# Altium footprint library WR-WTB_2.00mm.PcbLib: 70 footprints (part 3 of 5)
Each footprint in its own frame and in the unit in brackets; x right, y up, seen from the top. Pads: shape width x height; smd on the part's side, far side on the other; paste and mask are expansions set on the pad; w line width, h text height; cw(c..) or ccw(c..) is an arc to the next point about the centre after c.
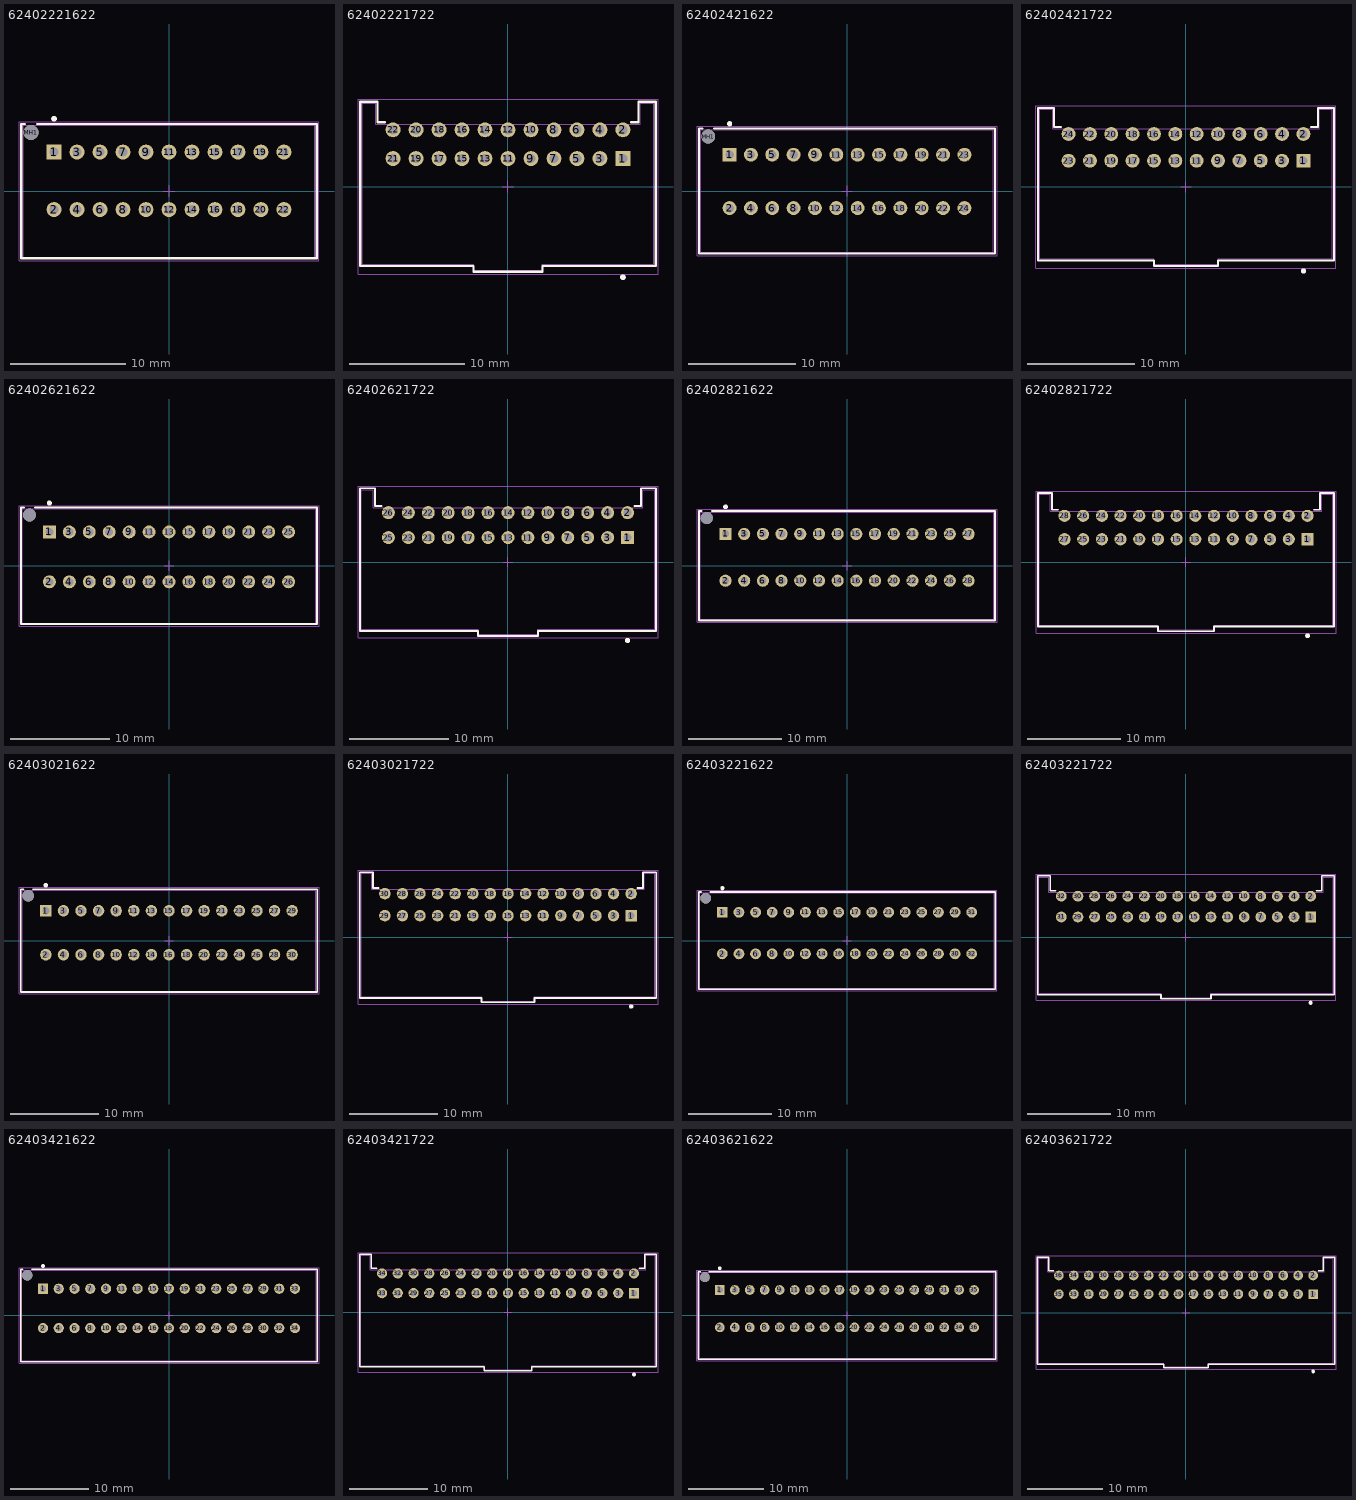
[diagram p2: the footprints below, top view; thin cyan lines are the x and y axes]

## 62402221622 [mm] "2.00mm Male Dual Row Vertical Shrouded Header with positive locking, 22p"
height 11.6
pads (23):
  rect 1.3x1.3 hole 0.8: 1(-10,3.4)
  round 1.3 hole 0.8: 2(-10,-1.6) 3(-8,3.4) 4(-8,-1.6) 5(-6,3.4) 6(-6,-1.6) 7(-4,3.4) 8(-4,-1.6) 9(-2,3.4) 10(-2,-1.6) 11(0,3.4) 12(0,-1.6) 13(2,3.4) 14(2,-1.6) 15(4,3.4) 16(4,-1.6) 17(6,3.4) 18(6,-1.6) 19(8,3.4) 20(8,-1.6) 21(10,3.4) 22(10,-1.6)
  round 1.3 hole 1.3 unplated: MH1(-12,5.1)
Top Overlay:
  circle w0.25: c-10,6.3 r0.125
  lines w0.2: -12.55,5.85 -12.85,5.85 -12.85,-5.85 12.85,-5.85 12.85,5.85 -11.45,5.85
Mechanical 13:
  lines w0.1: -12.7,-5.75 -12.7,5.75 ; -12.7,-5.75 12.7,-5.75 12.7,5.75 -12.7,5.75 ; -12.7,-5.75 -12.7,5.75
Mechanical 15:
  lines w0.05: -0.5,0 0.5,0 ; 0,-0.5 0,0.5 ; -13.05,-6.05 -13.05,6.05 13.05,6.05 13.05,-6.05 -13.05,-6.05
3D body "62402221622.stp": height 9.78, standoff -3.17, extent -12.7,-5.75 12.7,5.75

## 62402221722 [mm] "2.00mm Male Dual Row Horizontal Shrouded Header with positive locking, 22p"
height 11.7
pads (22):
  rect 1.3x1.3 hole 0.8: 1(10,2.45)
  round 1.3 hole 0.8: 2(10,4.95) 3(8,2.45) 4(8,4.95) 5(6,2.45) 6(6,4.95) 7(4,2.45) 8(4,4.95) 9(2,2.45) 10(2,4.95) 11(0,2.45) 12(0,4.95) 13(-2,2.45) 14(-2,4.95) 15(-4,2.45) 16(-4,4.95) 17(-6,2.45) 18(-6,4.95) 19(-8,2.45) 20(-8,4.95) 21(-10,2.45) 22(-10,4.95)
Top Overlay:
  circle w0.25: c10,-7.875 r0.125
  lines w0.2: -10.7,5.6 -11.35,5.6 -11.35,7.4 -12.85,7.4 -12.85,-6.9 -3,-6.9 -3,-7.4 3,-7.4 3,-6.9 12.85,-6.9 12.85,7.4 11.35,7.4 11.35,5.6 10.7,5.6
Mechanical 13:
  lines w0.1: -12.7,-6.75 -3,-6.75 -3,-7.25 3,-7.25 3,-6.75 12.7,-6.75 12.7,7.25 11.5,7.25 11.5,5.45 -11.5,5.45 -11.5,7.25 -12.7,7.25 -12.7,-6.75
Mechanical 15:
  lines w0.05: -0.5,0 0.5,0 ; 0,-0.5 0,0.5 ; -13.05,-7.6 13.05,-7.6 13.05,7.6 -13.05,7.6 -13.05,-7.6
3D body "62402221722.stp": height 11.73, standoff -3.17, extent -12.7,-7.25 12.7,7.25

## 62402421622 [mm] "2.00mm Male Dual Row Vertical Shrouded Header with positive locking, 24p"
height 11.6
pads (25):
  rect 1.3x1.3 hole 0.8: 1(-11,3.4)
  round 1.3 hole 0.8: 2(-11,-1.6) 3(-9,3.4) 4(-9,-1.6) 5(-7,3.4) 6(-7,-1.6) 7(-5,3.4) 8(-5,-1.6) 9(-3,3.4) 10(-3,-1.6) 11(-1,3.4) 12(-1,-1.6) 13(1,3.4) 14(1,-1.6) 15(3,3.4) 16(3,-1.6) 17(5,3.4) 18(5,-1.6) 19(7,3.4) 20(7,-1.6) 21(9,3.4) 22(9,-1.6) 23(11,3.4) 24(11,-1.6)
  round 1.3 hole 1.3 unplated: MH1(-13,5.1)
Top Overlay:
  circle w0.25: c-11,6.3 r0.125
  lines w0.2: -13.55,5.85 -13.85,5.85 -13.85,-5.85 13.85,-5.85 13.85,5.85 -12.45,5.85
Mechanical 13:
  lines w0.1: -13.7,-5.75 -13.7,5.75 ; -13.7,-5.75 13.7,-5.75 13.7,5.75 -13.7,5.75 ; -13.7,-5.75 -13.7,5.75
Mechanical 15:
  lines w0.05: -0.5,0 0.5,0 ; 0,-0.5 0,0.5 ; -14.05,-6.05 14.05,-6.05 14.05,6.05 -14.05,6.05 -14.05,-6.05
3D body "62402421622.stp": height 9.78, standoff -3.17, extent -13.7,-5.75 13.7,5.75

## 62402421722 [mm] "2.00mm Male Dual Row Horizontal Shrouded Header with positive locking, 24p"
height 11.7
pads (24):
  rect 1.3x1.3 hole 0.8: 1(11,2.45)
  round 1.3 hole 0.8: 2(11,4.95) 3(9,2.45) 4(9,4.95) 5(7,2.45) 6(7,4.95) 7(5,2.45) 8(5,4.95) 9(3,2.45) 10(3,4.95) 11(1,2.45) 12(1,4.95) 13(-1,2.45) 14(-1,4.95) 15(-3,2.45) 16(-3,4.95) 17(-5,2.45) 18(-5,4.95) 19(-7,2.45) 20(-7,4.95) 21(-9,2.45) 22(-9,4.95) 23(-11,2.45) 24(-11,4.95)
Top Overlay:
  circle w0.25: c11,-7.875 r0.125
  lines w0.2: -11.7,5.6 -12.35,5.6 -12.35,7.4 -13.85,7.4 -13.85,-6.9 -3,-6.9 -3,-7.4 3,-7.4 3,-6.9 13.85,-6.9 13.85,7.4 12.35,7.4 12.35,5.6 11.7,5.6
Mechanical 13:
  lines w0.1: -13.7,-6.75 -13.7,7.25 -12.5,7.25 -12.5,5.45 12.5,5.45 12.5,7.25 13.7,7.25 13.7,-6.75 3,-6.75 3,-7.25 -3,-7.25 -3,-6.75 -13.7,-6.75
Mechanical 15:
  lines w0.05: -0.5,0 0.5,0 ; 0,-0.5 0,0.5 ; -14.05,-7.6 -14.05,7.6 14.05,7.6 14.05,-7.6 -14.05,-7.6
3D body "62402421722.stp": height 11.73, standoff -3.17, extent -13.7,-7.25 13.7,7.25

## 62402621622 [mm] "2.00mm Male Dual Row Vertical Shrouded Header with positive locking, 26p"
height 11.6
pads (27):
  rect 1.3x1.3 hole 0.8: 1(-12,3.4)
  round 1.3 hole 0.8: 2(-12,-1.6) 3(-10,3.4) 4(-10,-1.6) 5(-8,3.4) 6(-8,-1.6) 7(-6,3.4) 8(-6,-1.6) 9(-4,3.4) 10(-4,-1.6) 11(-2,3.4) 12(-2,-1.6) 13(0,3.4) 14(0,-1.6) 15(2,3.4) 16(2,-1.6) 17(4,3.4) 18(4,-1.6) 19(6,3.4) 20(6,-1.6) 21(8,3.4) 22(8,-1.6) 23(10,3.4) 24(10,-1.6) 25(12,3.4) 26(12,-1.6)
  round 1.3 hole 1.3 unplated: MH1(-14,5.1)
Top Overlay:
  circle w0.25: c-12,6.3 r0.125
  lines w0.2: -14.55,5.85 -14.85,5.85 -14.85,-5.85 14.85,-5.85 14.85,5.85 -13.45,5.85
Mechanical 13:
  lines w0.1: -14.7,-5.75 -14.7,5.75 ; -14.7,-5.75 14.7,-5.75 14.7,5.75 -14.7,5.75 ; -14.7,-5.75 -14.7,5.75
Mechanical 15:
  lines w0.05: -0.5,0 0.5,0 ; 0,-0.5 0,0.5 ; -15.05,-6.05 -15.05,6.05 15.05,6.05 15.05,-6.05 -15.05,-6.05
3D body "62402621622.stp": height 9.78, standoff -3.17, extent -14.7,-5.75 14.7,5.75

## 62402621722 [mm] "2.00mm Male Dual Row Horizontal Shrouded Header with positive locking, 26p"
height 11.7
pads (26):
  rect 1.3x1.3 hole 0.8: 1(12,2.45)
  round 1.3 hole 0.8: 2(12,4.95) 3(10,2.45) 4(10,4.95) 5(8,2.45) 6(8,4.95) 7(6,2.45) 8(6,4.95) 9(4,2.45) 10(4,4.95) 11(2,2.45) 12(2,4.95) 13(0,2.45) 14(0,4.95) 15(-2,2.45) 16(-2,4.95) 17(-4,2.45) 18(-4,4.95) 19(-6,2.45) 20(-6,4.95) 21(-8,2.45) 22(-8,4.95) 23(-10,2.45) 24(-10,4.95) 25(-12,2.45) 26(-12,4.95)
Top Overlay:
  circle w0.25: c12,-7.875 r0.125
  lines w0.2: -12.7,5.6 -13.35,5.6 -13.35,7.4 -14.85,7.4 -14.85,-6.9 -3,-6.9 -3,-7.4 3,-7.4 3,-6.9 14.85,-6.9 14.85,7.4 13.35,7.4 13.35,5.6 12.7,5.6
Mechanical 13:
  lines w0.1: -14.7,-6.75 -14.7,7.25 -13.5,7.25 -13.5,5.45 13.5,5.45 13.5,7.25 14.7,7.25 14.7,-6.75 3,-6.75 3,-7.25 -3,-7.25 -3,-6.75 -14.7,-6.75
Mechanical 15:
  lines w0.05: -0.5,0 0.5,0 ; 0,-0.5 0,0.5 ; -15.05,-7.6 -15.05,7.6 15.05,7.6 15.05,-7.6 -15.05,-7.6
3D body "62402621722.stp": height 11.73, standoff -3.17, extent -14.7,-7.25 14.7,7.25

## 62402821622 [mm] "2.00mm Male Dual Row Vertical Shrouded Header with positive locking, 28p"
height 11.6
pads (29):
  rect 1.3x1.3 hole 0.8: 1(-13,3.4)
  round 1.3 hole 0.8: 2(-13,-1.6) 3(-11,3.4) 4(-11,-1.6) 5(-9,3.4) 6(-9,-1.6) 7(-7,3.4) 8(-7,-1.6) 9(-5,3.4) 10(-5,-1.6) 11(-3,3.4) 12(-3,-1.6) 13(-1,3.4) 14(-1,-1.6) 15(1,3.4) 16(1,-1.6) 17(3,3.4) 18(3,-1.6) 19(5,3.4) 20(5,-1.6) 21(7,3.4) 22(7,-1.6) 23(9,3.4) 24(9,-1.6) 25(11,3.4) 26(11,-1.6) 27(13,3.4) 28(13,-1.6)
  round 1.3 hole 1.3 unplated: MH1(-15,5.1)
Top Overlay:
  circle w0.25: c-13,6.3 r0.125
  lines w0.2: -15.55,5.85 -15.85,5.85 -15.85,-5.85 15.85,-5.85 15.85,5.85 -14.45,5.85
Mechanical 13:
  lines w0.1: -15.7,-5.75 -15.7,5.75 ; -15.7,-5.75 15.7,-5.75 15.7,5.75 -15.7,5.75 ; -15.7,-5.75 -15.7,5.75
Mechanical 15:
  lines w0.05: -0.5,0 0.5,0 ; 0,-0.5 0,0.5 ; -16.05,-6.05 -16.05,6.05 16.05,6.05 16.05,-6.05 -16.05,-6.05
3D body "62402821622.stp": height 9.78, standoff -3.17, extent -15.7,-5.75 15.7,5.75

## 62402821722 [mm] "2.00mm Male Dual Row Horizontal Shrouded Header with positive locking, 28p"
height 11.7
pads (28):
  rect 1.3x1.3 hole 0.8: 1(13,2.45)
  round 1.3 hole 0.8: 2(13,4.95) 3(11,2.45) 4(11,4.95) 5(9,2.45) 6(9,4.95) 7(7,2.45) 8(7,4.95) 9(5,2.45) 10(5,4.95) 11(3,2.45) 12(3,4.95) 13(1,2.45) 14(1,4.95) 15(-1,2.45) 16(-1,4.95) 17(-3,2.45) 18(-3,4.95) 19(-5,2.45) 20(-5,4.95) 21(-7,2.45) 22(-7,4.95) 23(-9,2.45) 24(-9,4.95) 25(-11,2.45) 26(-11,4.95) 27(-13,2.45) 28(-13,4.95)
Top Overlay:
  circle w0.25: c13,-7.875 r0.125
  lines w0.2: -13.7,5.6 -14.35,5.6 -14.35,7.4 -15.85,7.4 -15.85,-6.9 -3,-6.9 -3,-7.4 3,-7.4 3,-6.9 15.85,-6.9 15.85,7.4 14.35,7.4 14.35,5.6 13.7,5.6
Mechanical 13:
  lines w0.1: -15.7,-6.75 -15.7,7.25 -14.5,7.25 -14.5,5.45 14.5,5.45 14.5,7.25 15.7,7.25 15.7,-6.75 3,-6.75 3,-7.25 -3,-7.25 -3,-6.75 -15.7,-6.75
Mechanical 15:
  lines w0.05: -0.5,0 0.5,0 ; 0,-0.5 0,0.5 ; -16.05,-7.6 -16.05,7.6 16.05,7.6 16.05,-7.6 -16.05,-7.6
3D body "62402821722.stp": height 11.73, standoff -3.17, extent -15.7,-7.25 15.7,7.25

## 62403021622 [mm] "2.00mm Male Dual Row Vertical Shrouded Header with positive locking, 30p"
height 11.6
pads (31):
  rect 1.3x1.3 hole 0.8: 1(-14,3.4)
  round 1.3 hole 0.8: 2(-14,-1.6) 3(-12,3.4) 4(-12,-1.6) 5(-10,3.4) 6(-10,-1.6) 7(-8,3.4) 8(-8,-1.6) 9(-6,3.4) 10(-6,-1.6) 11(-4,3.4) 12(-4,-1.6) 13(-2,3.4) 14(-2,-1.6) 15(0,3.4) 16(0,-1.6) 17(2,3.4) 18(2,-1.6) 19(4,3.4) 20(4,-1.6) 21(6,3.4) 22(6,-1.6) 23(8,3.4) 24(8,-1.6) 25(10,3.4) 26(10,-1.6) 27(12,3.4) 28(12,-1.6) 29(14,3.4) 30(14,-1.6)
  round 1.3 hole 1.3 unplated: MH1(-16,5.1)
Top Overlay:
  circle w0.25: c-14,6.3 r0.125
  lines w0.2: -16.55,5.85 -16.85,5.85 -16.85,-5.85 16.85,-5.85 16.85,5.85 -15.45,5.85
Mechanical 13:
  lines w0.1: -16.7,-5.75 -16.7,5.75 ; -16.7,-5.75 16.7,-5.75 16.7,5.75 -16.7,5.75 ; -16.7,-5.75 -16.7,5.75
Mechanical 15:
  lines w0.05: -0.5,0 0.5,0 ; 0,-0.5 0,0.5 ; -17.05,-6.05 17.05,-6.05 17.05,6.05 -17.05,6.05 -17.05,-6.05
3D body "62403021622.stp": height 9.78, standoff -3.17, extent -16.7,-5.75 16.7,5.75

## 62403021722 [mm] "2.00mm Male Dual Row Horizontal Shrouded Header with positive locking, 30p"
height 11.7
pads (30):
  rect 1.3x1.3 hole 0.8: 1(14,2.45)
  round 1.3 hole 0.8: 2(14,4.95) 3(12,2.45) 4(12,4.95) 5(10,2.45) 6(10,4.95) 7(8,2.45) 8(8,4.95) 9(6,2.45) 10(6,4.95) 11(4,2.45) 12(4,4.95) 13(2,2.45) 14(2,4.95) 15(0,2.45) 16(0,4.95) 17(-2,2.45) 18(-2,4.95) 19(-4,2.45) 20(-4,4.95) 21(-6,2.45) 22(-6,4.95) 23(-8,2.45) 24(-8,4.95) 25(-10,2.45) 26(-10,4.95) 27(-12,2.45) 28(-12,4.95) 29(-14,2.45) 30(-14,4.95)
Top Overlay:
  circle w0.25: c14,-7.875 r0.125
  lines w0.2: -14.7,5.6 -15.35,5.6 -15.35,7.4 -16.85,7.4 -16.85,-6.9 -3,-6.9 -3,-7.4 3,-7.4 3,-6.9 16.85,-6.9 16.85,7.4 15.35,7.4 15.35,5.6 14.7,5.6
Mechanical 13:
  lines w0.1: -16.7,-6.75 -16.7,7.25 -15.5,7.25 -15.5,5.45 15.5,5.45 15.5,7.25 16.7,7.25 16.7,-6.75 3,-6.75 3,-7.25 -3,-7.25 -3,-6.75 -16.7,-6.75
Mechanical 15:
  lines w0.05: -0.5,0 0.5,0 ; 0,-0.5 0,0.5 ; -17.05,-7.6 -17.05,7.6 17.05,7.6 17.05,-7.6 -17.05,-7.6
3D body "62403021722.stp": height 11.73, standoff -3.17, extent -16.7,-7.25 16.7,7.25

## 62403221622 [mm] "2.00mm Male Dual Row Vertical Shrouded Header with positive locking, 32p"
height 11.6
pads (33):
  rect 1.3x1.3 hole 0.8: 1(-15,3.4)
  round 1.3 hole 0.8: 2(-15,-1.6) 3(-13,3.4) 4(-13,-1.6) 5(-11,3.4) 6(-11,-1.6) 7(-9,3.4) 8(-9,-1.6) 9(-7,3.4) 10(-7,-1.6) 11(-5,3.4) 12(-5,-1.6) 13(-3,3.4) 14(-3,-1.6) 15(-1,3.4) 16(-1,-1.6) 17(1,3.4) 18(1,-1.6) 19(3,3.4) 20(3,-1.6) 21(5,3.4) 22(5,-1.6) 23(7,3.4) 24(7,-1.6) 25(9,3.4) 26(9,-1.6) 27(11,3.4) 28(11,-1.6) 29(13,3.4) 30(13,-1.6) 31(15,3.4) 32(15,-1.6)
  round 1.3 hole 1.3 unplated: MH1(-17,5.1)
Top Overlay:
  circle w0.25: c-15,6.3 r0.125
  lines w0.2: -17.55,5.85 -17.85,5.85 -17.85,-5.85 17.85,-5.85 17.85,5.85 -16.45,5.85
Mechanical 13:
  lines w0.1: -17.7,-5.75 -17.7,5.75 ; -17.7,-5.75 17.7,-5.75 17.7,5.75 -17.7,5.75 ; -17.7,-5.75 -17.7,5.75
Mechanical 15:
  lines w0.05: -0.5,0 0.5,0 ; 0,-0.5 0,0.5 ; -18.05,-6.05 -18.05,6.05 18.05,6.05 18.05,-6.05 -18.05,-6.05
3D body "62403221622.stp": height 9.78, standoff -3.17, extent -17.7,-5.75 17.7,5.75

## 62403221722 [mm] "2.00mm Male Dual Row Horizontal Shrouded Header with positive locking, 32p"
height 11.7
pads (32):
  rect 1.3x1.3 hole 0.8: 1(15,2.45)
  round 1.3 hole 0.8: 2(15,4.95) 3(13,2.45) 4(13,4.95) 5(11,2.45) 6(11,4.95) 7(9,2.45) 8(9,4.95) 9(7,2.45) 10(7,4.95) 11(5,2.45) 12(5,4.95) 13(3,2.45) 14(3,4.95) 15(1,2.45) 16(1,4.95) 17(-1,2.45) 18(-1,4.95) 19(-3,2.45) 20(-3,4.95) 21(-5,2.45) 22(-5,4.95) 23(-7,2.45) 24(-7,4.95) 25(-9,2.45) 26(-9,4.95) 27(-11,2.45) 28(-11,4.95) 29(-13,2.45) 30(-13,4.95) 31(-15,2.45) 32(-15,4.95)
Top Overlay:
  circle w0.25: c15,-7.875 r0.125
  lines w0.2: -15.7,5.6 -16.35,5.6 -16.35,7.4 -17.85,7.4 -17.85,-6.9 -3,-6.9 -3,-7.4 3,-7.4 3,-6.9 17.85,-6.9 17.85,7.4 16.35,7.4 16.35,5.6 15.7,5.6
Mechanical 13:
  lines w0.1: -17.7,-6.75 -3,-6.75 -3,-7.25 3,-7.25 3,-6.75 17.7,-6.75 17.7,7.25 16.5,7.25 16.5,5.45 -16.5,5.45 -16.5,7.25 -17.7,7.25 -17.7,-6.75
Mechanical 15:
  lines w0.05: -0.5,0 0.5,0 ; 0,-0.5 0,0.5 ; -18.05,-7.6 18.05,-7.6 18.05,7.6 -18.05,7.6 -18.05,-7.6
3D body "62403221722.stp": height 11.73, standoff -3.17, extent -17.7,-7.25 17.7,7.25

## 62403421622 [mm] "2.00mm Male Dual Row Vertical Shrouded Header with positive locking, 34p"
height 11.6
pads (35):
  rect 1.3x1.3 hole 0.8: 1(-16,3.4)
  round 1.3 hole 0.8: 2(-16,-1.6) 3(-14,3.4) 4(-14,-1.6) 5(-12,3.4) 6(-12,-1.6) 7(-10,3.4) 8(-10,-1.6) 9(-8,3.4) 10(-8,-1.6) 11(-6,3.4) 12(-6,-1.6) 13(-4,3.4) 14(-4,-1.6) 15(-2,3.4) 16(-2,-1.6) 17(0,3.4) 18(0,-1.6) 19(2,3.4) 20(2,-1.6) 21(4,3.4) 22(4,-1.6) 23(6,3.4) 24(6,-1.6) 25(8,3.4) 26(8,-1.6) 27(10,3.4) 28(10,-1.6) 29(12,3.4) 30(12,-1.6) 31(14,3.4) 32(14,-1.6) 33(16,3.4) 34(16,-1.6)
  round 1.3 hole 1.3 unplated: MH1(-18,5.1)
Top Overlay:
  circle w0.25: c-16,6.3 r0.125
  lines w0.2: -18.55,5.85 -18.85,5.85 -18.85,-5.85 18.85,-5.85 18.85,5.85 -17.45,5.85
Mechanical 13:
  lines w0.1: -18.7,-5.75 -18.7,5.75 ; -18.7,-5.75 18.7,-5.75 18.7,5.75 -18.7,5.75 ; -18.7,-5.75 -18.7,5.75
Mechanical 15:
  lines w0.05: -0.5,0 0.5,0 ; 0,-0.5 0,0.5 ; -19.05,-6.05 -19.05,6.05 19.05,6.05 19.05,-6.05 -19.05,-6.05
3D body "62403421622.stp": height 9.78, standoff -3.17, extent -18.7,-5.75 18.7,5.75

## 62403421722 [mm] "2.00mm Male Dual Row Horizontal Shrouded Header with positive locking, 34p"
height 11.7
pads (34):
  rect 1.3x1.3 hole 0.8: 1(16,2.45)
  round 1.3 hole 0.8: 2(16,4.95) 3(14,2.45) 4(14,4.95) 5(12,2.45) 6(12,4.95) 7(10,2.45) 8(10,4.95) 9(8,2.45) 10(8,4.95) 11(6,2.45) 12(6,4.95) 13(4,2.45) 14(4,4.95) 15(2,2.45) 16(2,4.95) 17(0,2.45) 18(0,4.95) 19(-2,2.45) 20(-2,4.95) 21(-4,2.45) 22(-4,4.95) 23(-6,2.45) 24(-6,4.95) 25(-8,2.45) 26(-8,4.95) 27(-10,2.45) 28(-10,4.95) 29(-12,2.45) 30(-12,4.95) 31(-14,2.45) 32(-14,4.95) 33(-16,2.45) 34(-16,4.95)
Top Overlay:
  circle w0.25: c16,-7.875 r0.125
  lines w0.2: -16.7,5.6 -17.35,5.6 -17.35,7.4 -18.85,7.4 -18.85,-6.9 -3,-6.9 -3,-7.4 3,-7.4 3,-6.9 18.85,-6.9 18.85,7.4 17.35,7.4 17.35,5.6 16.7,5.6
Mechanical 13:
  lines w0.1: -18.7,-6.75 -18.7,7.25 -17.5,7.25 -17.5,5.45 17.5,5.45 17.5,7.25 18.7,7.25 18.7,-6.75 3,-6.75 3,-7.25 -3,-7.25 -3,-6.75 -18.7,-6.75
Mechanical 15:
  lines w0.05: -0.5,0 0.5,0 ; 0,-0.5 0,0.5 ; -19.05,-7.6 -19.05,7.6 19.05,7.6 19.05,-7.6 -19.05,-7.6
3D body "62403421722.stp": height 11.73, standoff -3.17, extent -18.7,-7.25 18.7,7.25

## 62403621622 [mm] "2.00mm Male Dual Row Vertical Shrouded Header with positive locking, 36p"
height 11.6
pads (37):
  rect 1.3x1.3 hole 0.8: 1(-17,3.4)
  round 1.3 hole 0.8: 2(-17,-1.6) 3(-15,3.4) 4(-15,-1.6) 5(-13,3.4) 6(-13,-1.6) 7(-11,3.4) 8(-11,-1.6) 9(-9,3.4) 10(-9,-1.6) 11(-7,3.4) 12(-7,-1.6) 13(-5,3.4) 14(-5,-1.6) 15(-3,3.4) 16(-3,-1.6) 17(-1,3.4) 18(-1,-1.6) 19(1,3.4) 20(1,-1.6) 21(3,3.4) 22(3,-1.6) 23(5,3.4) 24(5,-1.6) 25(7,3.4) 26(7,-1.6) 27(9,3.4) 28(9,-1.6) 29(11,3.4) 30(11,-1.6) 31(13,3.4) 32(13,-1.6) 33(15,3.4) 34(15,-1.6) 35(17,3.4) 36(17,-1.6)
  round 1.3 hole 1.3 unplated: MH1(-19,5.1)
Top Overlay:
  circle w0.25: c-17,6.3 r0.125
  lines w0.2: -19.55,5.85 -19.85,5.85 -19.85,-5.85 19.85,-5.85 19.85,5.85 -18.45,5.85
Mechanical 13:
  lines w0.1: -19.7,-5.75 -19.7,5.75 ; -19.7,-5.75 19.7,-5.75 19.7,5.75 -19.7,5.75 ; -19.7,-5.75 -19.7,5.75
Mechanical 15:
  lines w0.05: -0.5,0 0.5,0 ; 0,-0.5 0,0.5 ; -20.05,-6.05 -20.05,6.05 20.05,6.05 20.05,-6.05 -20.05,-6.05
3D body "62403621622.stp": height 9.78, standoff -3.17, extent -19.7,-5.75 19.7,5.75

## 62403621722 [mm] "2.00mm Male Dual Row Horizontal Shrouded Header with positive locking, 36p"
height 11.7
pads (36):
  rect 1.3x1.3 hole 0.8: 1(17,2.45)
  round 1.3 hole 0.8: 2(17,4.95) 3(15,2.45) 4(15,4.95) 5(13,2.45) 6(13,4.95) 7(11,2.45) 8(11,4.95) 9(9,2.45) 10(9,4.95) 11(7,2.45) 12(7,4.95) 13(5,2.45) 14(5,4.95) 15(3,2.45) 16(3,4.95) 17(1,2.45) 18(1,4.95) 19(-1,2.45) 20(-1,4.95) 21(-3,2.45) 22(-3,4.95) 23(-5,2.45) 24(-5,4.95) 25(-7,2.45) 26(-7,4.95) 27(-9,2.45) 28(-9,4.95) 29(-11,2.45) 30(-11,4.95) 31(-13,2.45) 32(-13,4.95) 33(-15,2.45) 34(-15,4.95) 35(-17,2.45) 36(-17,4.95)
Top Overlay:
  circle w0.25: c17,-7.875 r0.125
  lines w0.2: -17.7,5.6 -18.35,5.6 -18.35,7.4 -19.85,7.4 -19.85,-6.9 -3,-6.9 -3,-7.4 3,-7.4 3,-6.9 19.85,-6.9 19.85,7.4 18.35,7.4 18.35,5.6 17.7,5.6
Mechanical 13:
  lines w0.1: -19.7,-6.75 -19.7,7.25 -18.5,7.25 -18.5,5.45 18.5,5.45 18.5,7.25 19.7,7.25 19.7,-6.75 3,-6.75 3,-7.25 -3,-7.25 -3,-6.75 -19.7,-6.75
Mechanical 15:
  lines w0.05: -0.5,0 0.5,0 ; 0,-0.5 0,0.5 ; -20.05,-7.6 -20.05,7.6 20.05,7.6 20.05,-7.6 -20.05,-7.6
3D body "62403621722.stp": height 11.73, standoff -3.17, extent -19.7,-7.25 19.7,7.25